# Altium schematic symbol library STM32.SchLib: 19 symbols
Pins are listed as number, name and electrical type; pins without a type are passive.

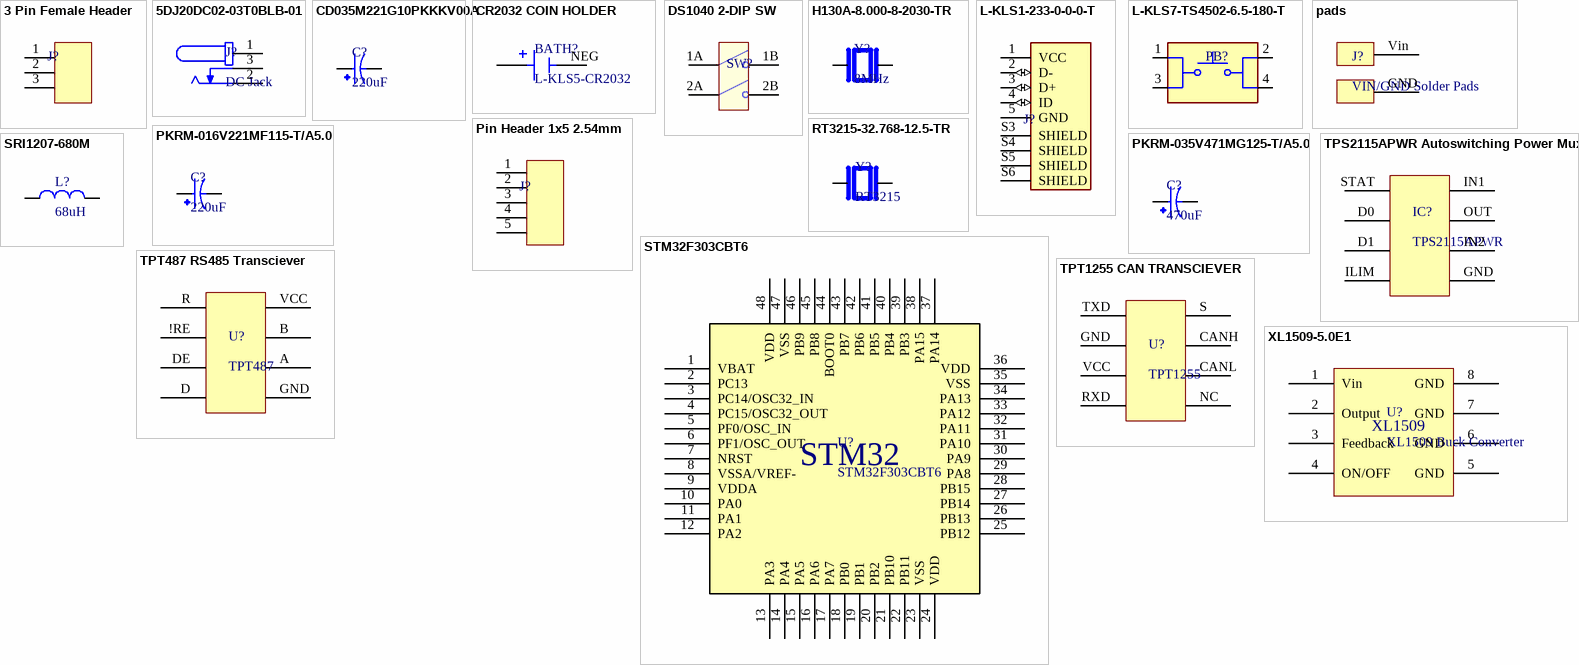
[diagram p0: symbols 3 Pin Female Header to XL1509-5.0E1]

## 3 Pin Female Header
designator J?, comment 3 pin female header  (value not drawn)
3 Pin Female Header 2.54mm pitch
footprint 3 pin female hedaer
pins: 1, 2, 3

## 5DJ20DC02-03T0BLB-01
designator J?, comment DC Jack
Connector, dc jack 5.5x2.1 mm, PCB mount, 90 degrees, nickel plated, PBT, thru hole
footprint 5DJ20DC02-03T0BLB-01 (DC JACK)
pins: 1 Vin, 2 SWITCH, 3 GND

## CD035M221G10PKKKV00A
designator C?, comment 220uF
CAP.ALU 220uF 35V 10x10 ±20% 3000 Hrs @ 105 °C Radial Electrolytic AEC-Q200 SMT
footprint CD035M221G10PKKKV00A
pins: 1 P, 2 N

## CR2032 COIN HOLDER
designator BATH?, comment L-KLS5-CR2032
BATTERY HOLDER SMD FOR CR2032 METAL
footprint RC2032 COIN HOLDER
pins: 1+ POS, 2+ POS, NEG

## DS1040 2-DIP SW
designator SW?, comment DS1040  (value not drawn)
SWITCH DIP 2 Pos. SPST 100mA 24VDC THT V/T
footprint DS1040 2-DIP SW
pins: 1A COM1, 1B NO1, 2A COM2, 2B NO2

## H130A-8.000-8-2030-TR
designator Y?, comment 8MHz
CRYSTAL 8MHz 8pF 20PPM SMT
footprint H130A-8.000-8-2030-TR
pins: 1, 2

## L-KLS1-233-0-0-0-T
designator J?, comment USB Micro B 5 Pin Female  (value not drawn)
CONNECTOR USB MICRO B TYPE FEMALE SMT R/A W/O POST
footprint USB MICRO B
pins: 1 VCC (power), 2 D- (io), 3 D+ (io), 4 ID (io), 5 GND (power), S3 SHIELD, S4 SHIELD, S5 SHIELD, S6 SHIELD

## L-KLS7-TS4502-6.5-180-T
designator PB?, comment 4.5mm x 4.5mm  (value not drawn)
SWITCH TACT 4.5x4.5MM 6.5MM 180gf SMD
footprint L-KLS7-TS4502-6.5-180-T
pins: 1, 2, 3, 4

## pads
designator J?, comment VIN/GND Solder Pads
2-pin SMD solder pads for external 9-24V power input
footprint pads
pins: GND, Vin

## Pin Header 1x5 2.54mm
designator J?, comment Pin Header 1x5  (value not drawn)
PIN HEADER 5PIN(1x5) 2.54mm THT V/T 3X6MM
footprint Pin Header 1x5 2.54mm
pins: 1, 2, 3, 4, 5

## PKRM-016V221MF115-T/A5.0
designator C?, comment 220uF
CAP.ALU 220uF 16V 8x11.5 5mm 20% 2000 Hrs @ 105 °C Radial Electrolytic THT
footprint PKRM-016V221MF115-T/A5.0
pins: 1, 2

## PKRM-035V471MG125-T/A5.0
designator C?, comment 470uF
CAP.ALU 470uF 35V 10x12.5 5mm 20% 2000 Hrs @ 105 °C Radial Electrolytic THT
footprint PKRM-035V471MG125-T/A5.0
pins: N, P

## RT3215-32.768-12.5-TR
designator Y?, comment RT3215
CRYSTAL 32.768kHz 12.5pF 20PPM SMD TR
footprint RT3215-32.768-12.5-TR
pins: 1, 2

## SRI1207-680M
designator L?, comment 68uH
INDUCTOR POWER 68UH 12X12MM SMD 3.8 A
footprint SRI1207-680M
pins: 1, 2

## STM32F303CBT6
designator U?
footprint STM32F303CBT6
pins: 1 VBAT, 2 PC13, 3 PC14/OSC32_IN, 4 PC15/OSC32_OUT, 5 PF0/OSC_IN, 6 PF1/OSC_OUT, 7 NRST, 8 VSSA/VREF-, 9 VDDA, 10 PA0, 11 PA1, 12 PA2, 13 PA3, 14 PA4, 15 PA5, 16 PA6, 17 PA7, 18 PB0, 19 PB1, 20 PB2, 21 PB10, 22 PB11, 23 VSS, 24 VDD, 25 PB12, 26 PB13, 27 PB14, 28 PB15, 29 PA8, 30 PA9, 31 PA10, 32 PA11, 33 PA12, 34 PA13, 35 VSS, 36 VDD, 37 PA14, 38 PA15, 39 PB3, 40 PB4, 41 PB5, 42 PB6, 43 PB7, 44 BOOT0, 45 PB8, 46 PB9, 47 VSS, 48 VDD
text: STM32

## TPS2115APWR Autoswitching Power Mux
designator IC?, comment TPS2115APWR
IC-2115 OR CONTROLLER SRC SELECT 8-TSSOP
footprint TPS2115APWR
pins: D0 2, D1 3, GND 5, ILIM 4, IN1 8, IN2 6, OUT 7, STAT 1

## TPT487 RS485 Transciever
designator U?, comment TPT487
IC-487 TRANSCEIVER 1/1 8-SOP
footprint TPT487
pins: !RE 2, A 6, B 7, D 4, DE 3, GND 5, R 1, VCC 8

## TPT1255 CAN TRANSCIEVER
designator U?, comment TPT1255
IC-1255 TRANSCEIVER CAN 8-SOP
footprint TPT1255 (TPT1255 CAN TRANSCIEVER)
pins: CANH 7, CANL 6, GND 2, NC 5, RXD 4, S 8, TXD 1, VCC 3

## XL1509-5.0E1
designator U?, comment XL1509 Buck Converter
IC-1509 REG BUCK DC/DC CONVERTER 5V 8SOP
footprint XL1509-5.0E1
pins: 1 Vin, 2 Output, 3 Feedback, 4 ON/OFF, 5 GND, 6 GND, 7 GND, 8 GND
text: XL1509